# Altium footprint library CoilcraftPCB.PcbLib: 320 footprints (part 7 of 20)
Each footprint in its own frame and in the unit in brackets; x right, y up, seen from the top. Pads: shape width x height; smd on the part's side, far side on the other; paste and mask are expansions set on the pad; w line width, h text height; cw(c..) or ccw(c..) is an arc to the next point about the centre after c.
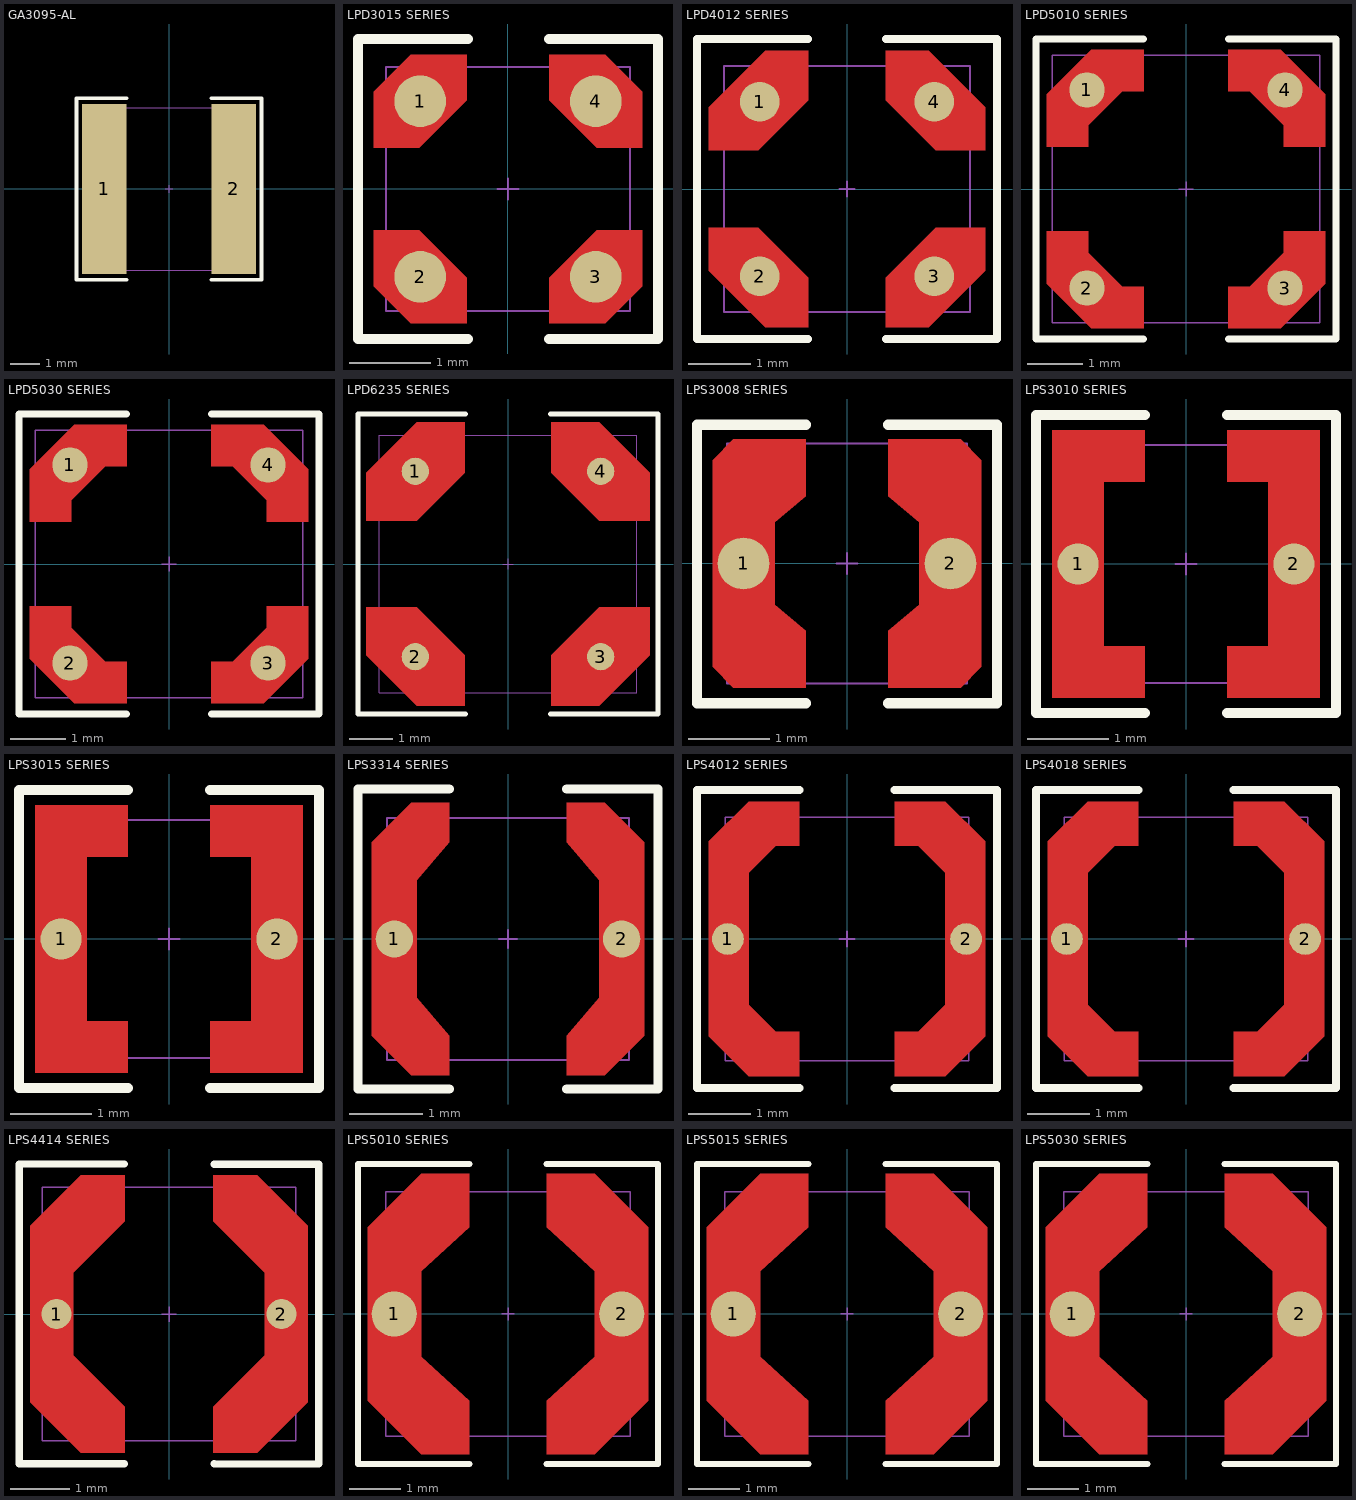
[diagram p6: the footprints below, top view; thin cyan lines are the x and y axes]

## GA3095-AL [mil] "Coilcraft High Current Air Core Inductors"
height 195
pads (2):
  rect 60x230 smd: 1(-87.5,0) 2(87.5,0)
Top Overlay:
  lines w5: -57.5,-122.5 -125,-122.5 -125,122.5 -57.5,122.5 ; 57.5,-122.5 125,-122.5 125,122.5 57.5,122.5
Mechanical 13:
  lines w1: -5,0 5,0 ; 0,-5 0,5
Mechanical 14:
  lines w1: -115,-110 115,-110 115,110 -115,110 -115,-110
3D body: height 180, standoff 0, extent -109.5,-104.5 109.5,105.5

## LPD3015 SERIES [mil] "Coilcraft Coupled Inductors"
height 55
pads (4):
  round 25 smd mask+0: 1(-42.43,42.43) 2(-42.43,-42.43) 3(42.43,-42.43) 4(42.43,42.43)
Top Layer:
  region: -43,20 -20,43 -20,65 -47,65 -65,47 -65,20
  region: -20,-43 -43,-20 -65,-20 -65,-47 -47,-65 -20,-65
  region: 43,-20 20,-43 20,-65 47,-65 65,-47 65,-20
  region: 20,43 43,20 65,20 65,47 47,65 20,65
Top Overlay:
  lines w5: -19.5,-72.5 -72.5,-72.5 -72.5,72.5 -19.5,72.5 ; 20,-72.5 72.5,-72.5 72.5,72.5 20,72.5
Top Paste:
  region: 20,43 43,20 65,20 65,47 47,65 20,65
  region: 43,-20 20,-43 20,-65 47,-65 65,-47 65,-20
  region: -20,-43 -43,-20 -65,-20 -65,-47 -47,-65 -20,-65
  region: -43,20 -20,43 -20,65 -47,65 -65,47 -65,20
Mechanical 13:
  lines w1: -5,0 5,0 ; 0,-5 0,5
Mechanical 14:
  lines w1: -59,-59 59,-59 59,59 -59,59 -59,-59
3D body: height 59.15, standoff 0.09, extent -60.55,-60.6 60.55,60.5

## LPD4012 SERIES [mil] "Coilcraft Coupled Inductors"
height 43.3
pads (4):
  round 25 smd mask+0: 1(-55,55) 2(-55,-55) 3(55,-55) 4(55,55)
Top Layer:
  region: 56,-24.5 87,-24.5 87,-51.5 51.5,-87 24.5,-87 24.5,-56
  region: -24.5,-56 -24.5,-87 -51.5,-87 -87,-51.5 -87,-24.5 -56,-24.5
  region: -56,24.5 -87,24.5 -87,51.5 -51.5,87 -24.5,87 -24.5,56
  region: 24.5,56 24.5,87 51.5,87 87,51.5 87,24.5 56,24.5
Top Overlay:
  lines w5: -24.5,-94.5 -94.5,-94.5 -94.5,94.5 -24.5,94.5 ; 24.5,-94.5 94.5,-94.5 94.5,94.5 24.5,94.5
Top Paste:
  region: 24.5,56 24.5,87 51.5,87 87,51.5 87,24.5 56,24.5
  region: -56,24.5 -87,24.5 -87,51.5 -51.5,87 -24.5,87 -24.5,56
  region: -24.5,-56 -24.5,-87 -51.5,-87 -87,-51.5 -87,-24.5 -56,-24.5
  region: 56,-24.5 87,-24.5 87,-51.5 51.5,-87 24.5,-87 24.5,-56
Mechanical 13:
  lines w1: -5,0 5,0 ; 0,-5 0,5
Mechanical 14:
  lines w1: -77.5,-77.5 -77.5,77.5 77.5,77.5 77.5,-77.5 -77.5,-77.5
3D body: height 47.34, standoff 0.09, extent -79.05,-79.11 79.05,79

## LPD5010 SERIES [mil] "Coilcraft Coupled Inductors"
height 35
pads (4):
  round 25 smd mask+0: 1(-70,70) 2(-70,-70) 3(70,-70) 4(70,70)
Top Layer:
  region: 30,-69 30,-98.5 67,-98.5 98.5,-67 98.5,-30 69,-30 69,-45 45,-69
  region: 69,30 98.5,30 98.5,67 67,98.5 30,98.5 30,69 45,69 69,45
  region: -30,69 -30,98.5 -67,98.5 -98.5,67 -98.5,30 -69,30 -69,45 -45,69
  region: -69,-30 -98.5,-30 -98.5,-67 -67,-98.5 -30,-98.5 -30,-69 -45,-69 -69,-45
Top Overlay:
  lines w5: -30,-106 -106,-106 -106,106 -30,106 ; 30,-106 106,-106 106,106 30,106
Top Paste:
  region: -69,-30 -98.5,-30 -98.5,-67 -67,-98.5 -30,-98.5 -30,-69 -45,-69 -69,-45
  region: -30,69 -30,98.5 -67,98.5 -98.5,67 -98.5,30 -69,30 -69,45 -45,69
  region: 69,30 98.5,30 98.5,67 67,98.5 30,98.5 30,69 45,69 69,45
  region: 30,-69 30,-98.5 67,-98.5 98.5,-67 98.5,-30 69,-30 69,-45 45,-69
Mechanical 13:
  lines w1: -5,0 5,0 ; 0,-5 0,5
Mechanical 14:
  lines w1: -94.5,-94.5 94.5,-94.5 94.5,94.5 -94.5,94.5 -94.5,-94.5
3D body: height 39.46, standoff 0.09, extent -95.98,-95.97 95.98,96

## LPD5030 SERIES [mil] "Coilcraft Coupled Inductors"
height 114
pads (4):
  round 25 smd mask+0: 1(-70,70) 2(-70,-70) 3(70,-70) 4(70,70)
Top Layer:
  region: 30,-69 30,-98.5 67,-98.5 98.5,-67 98.5,-30 69,-30 69,-45 45,-69
  region: 69,30 98.5,30 98.5,67 67,98.5 30,98.5 30,69 45,69 69,45
  region: -30,69 -30,98.5 -67,98.5 -98.5,67 -98.5,30 -69,30 -69,45 -45,69
  region: -69,-30 -98.5,-30 -98.5,-67 -67,-98.5 -30,-98.5 -30,-69 -45,-69 -69,-45
Top Overlay:
  lines w5: -30,-106 -106,-106 -106,106 -30,106 ; 30,-106 106,-106 106,106 30,106
Top Paste:
  region: -69,-30 -98.5,-30 -98.5,-67 -67,-98.5 -30,-98.5 -30,-69 -45,-69 -69,-45
  region: -30,69 -30,98.5 -67,98.5 -98.5,67 -98.5,30 -69,30 -69,45 -45,69
  region: 69,30 98.5,30 98.5,67 67,98.5 30,98.5 30,69 45,69 69,45
  region: 30,-69 30,-98.5 67,-98.5 98.5,-67 98.5,-30 69,-30 69,-45 45,-69
Mechanical 13:
  lines w1: -5,0 5,0 ; 0,-5 0,5
Mechanical 14:
  lines w1: -94.5,-94.5 94.5,-94.5 94.5,94.5 -94.5,94.5 -94.5,-94.5
3D body: height 118.2, standoff 0.09, extent -95.98,-95.97 95.98,96

## LPD6235 SERIES [mil] "Coilcraft Coupled Inductors"
height 138
pads (4):
  round 25 smd mask+0: 1(-85,85) 2(-85,-85) 3(85,-85) 4(85,85)
Top Layer:
  region: 39.5,83.5 39.5,130 83.5,130 130,83.5 130,39.5 83.5,39.5
  region: -83.5,39.5 -130,39.5 -130,83.5 -83.5,130 -39.5,130 -39.5,83.5
  region: -39.5,-83.5 -39.5,-130 -83.5,-130 -130,-83.5 -130,-39.5 -83.5,-39.5
  region: 83.5,-39.5 130,-39.5 130,-83.5 83.5,-130 39.5,-130 39.5,-83.5
Top Overlay:
  lines w5: -39,-137.5 -137.5,-137.5 -137.5,137.5 -39,137.5 ; 39,-137.5 137.5,-137.5 137.5,137.5 39,137.5
Top Paste:
  region: 83.5,-39.5 130,-39.5 130,-83.5 83.5,-130 39.5,-130 39.5,-83.5
  region: -39.5,-83.5 -39.5,-130 -83.5,-130 -130,-83.5 -130,-39.5 -83.5,-39.5
  region: -83.5,39.5 -130,39.5 -130,83.5 -83.5,130 -39.5,130 -39.5,83.5
  region: 39.5,83.5 39.5,130 83.5,130 130,83.5 130,39.5 83.5,39.5
Mechanical 13:
  lines w1: -5,0 5,0 ; 0,-5 0,5
Mechanical 14:
  lines w1: -118,-118 118,-118 118,118 -118,118 -118,-118
3D body: height 139.8, standoff 2, extent -119.68,-119.37 119.68,120

## LPS3008 SERIES [mil] "Coilcraft Shielded SMT Power Inductors"
height 31.5
pads (2):
  round 25 smd mask+0: 1(-50,0) 2(50,0)
Top Layer:
  region: 35,20 20,32.5 20,60 55,60 65,50 65,-50 55,-60 20,-60 20,-32.5 35,-20
  region: -35,-20 -20,-32.5 -20,-60 -55,-60 -65,-50 -65,50 -55,60 -20,60 -20,32.5 -35,20
Top Overlay:
  lines w5: -20,-67.5 -72.5,-67.5 -72.5,67 -20,67 ; 20,-67.5 72.5,-67.5 72.5,67 20,67
Top Paste:
  region: -35,-20 -20,-32.5 -20,-60 -55,-60 -65,-50 -65,50 -55,60 -20,60 -20,32.5 -35,20
  region: 35,20 20,32.5 20,60 55,60 65,50 65,-50 55,-60 20,-60 20,-32.5 35,-20
Mechanical 13:
  lines w1: -5,0 5,0 ; 0,-5 0,5
Mechanical 14:
  lines w1: -58,-58 58,-58 58,58 -58,58 -58,-58
3D body: height 31.5, standoff 0, extent -62.12,-62.12 62.13,62.13

## LPS3010 SERIES [mil] "Coilcraft Shielded SMT Power Inductors"
height 35
pads (2):
  round 20 smd mask+0: 1(-52.5,0) 2(52.5,0)
Top Layer:
  region: -65,65 -20,65 -20,40 -40,40 -40,-40 -20,-40 -20,-65 -65,-65
  region: 65,-65 20,-65 20,-40 40,-40 40,40 20,40 20,65 65,65
Top Overlay:
  lines w5: -20,-72.5 -73,-72.5 -73,72.5 -20,72.5 ; 20,-72.5 73,-72.5 73,72.5 20,72.5
Top Paste:
  region: 65,-65 20,-65 20,-40 40,-40 40,40 20,40 20,65 65,65
  region: -65,65 -20,65 -20,40 -40,40 -40,-40 -20,-40 -20,-65 -65,-65
Mechanical 13:
  lines w1: -5,0 5,0 ; 0,-5 0,5
Mechanical 14:
  lines w1: -58,-58 -58,58 58,58 58,-58 -58,-58
3D body: height 39.37, standoff 0, extent -62.12,-62.12 62.13,62.13

## LPS3015 SERIES [mil] "Coilcraft Shielded SMT Power Inductors"
height 55
pads (2):
  round 20 smd mask+0: 1(-52.5,0) 2(52.5,0)
Top Layer:
  region: -65,65 -20,65 -20,40 -40,40 -40,-40 -20,-40 -20,-65 -65,-65
  region: 65,-65 20,-65 20,-40 40,-40 40,40 20,40 20,65 65,65
Top Overlay:
  lines w5: -20,-72.5 -73,-72.5 -73,72.5 -20,72.5 ; 20,-72.5 73,-72.5 73,72.5 20,72.5
Top Paste:
  region: 65,-65 20,-65 20,-40 40,-40 40,40 20,40 20,65 65,65
  region: -65,65 -20,65 -20,40 -40,40 -40,-40 -20,-40 -20,-65 -65,-65
Mechanical 13:
  lines w1: -5,0 5,0 ; 0,-5 0,5
Mechanical 14:
  lines w1: -58,-58 -58,58 58,58 58,-58 -58,-58
3D body: height 59.06, standoff 0, extent -62.12,-62.12 62.13,62.13

## LPS3314 SERIES [mil] "Coilcraft Shielded SMT Power Inductors"
height 51.2
pads (2):
  round 20 smd mask+0: 1(-61,0) 2(61,0)
Top Layer:
  region: 49,31.5 31.5,52 31.5,73 52,73 73,52 73,-52 52,-73 31.5,-73 31.5,-52 49,-31.5
  region: -49,-31.5 -31.5,-52 -31.5,-73 -52,-73 -73,-52 -73,52 -52,73 -31.5,73 -31.5,52 -49,31.5
Top Overlay:
  lines w5: -31.5,-80.5 -80.5,-80.5 -80.5,80.5 -31.5,80.5 ; 31.5,-80.5 80.5,-80.5 80.5,80.5 31.5,80.5
Top Paste:
  region: -49,-31.5 -31.5,-52 -31.5,-73 -52,-73 -73,-52 -73,52 -52,73 -31.5,73 -31.5,52 -49,31.5
  region: 49,31.5 31.5,52 31.5,73 52,73 73,52 73,-52 52,-73 31.5,-73 31.5,-52 49,-31.5
Mechanical 13:
  lines w1: -5,0 5,0 ; 0,-5 0,5
Mechanical 14:
  lines w1: -65,-65 65,-65 65,65 -65,65 -65,-65
3D body: height 55.12, standoff 0, extent -66.92,-66.92 66.93,66.93

## LPS4012 SERIES [mil] "Coilcraft Shielded SMT Power Inductors"
height 43.3
pads (2):
  round 20 smd mask+0: 1(-75,0) 2(75,0)
Top Layer:
  region: 30.03,86.61 62.03,86.61 87.03,61.61 87.03,-61.39 62.03,-86.39 30.03,-86.39 30.03,-58.39 45.03,-58.39 62.03,-41.39 62.03,41.61 45.03,58.61 30.03,58.61
  region: -29.97,-86.39 -61.97,-86.39 -86.97,-61.39 -86.97,61.61 -61.97,86.61 -29.97,86.61 -29.97,58.61 -44.97,58.61 -61.97,41.61 -61.97,-41.39 -44.97,-58.39 -29.97,-58.39
Top Overlay:
  lines w5: -30,-94 -94.5,-94 -94.5,94 -30,94 ; 30.03,-94 94.5,-94 94.5,94 30.03,94
Top Paste:
  region: 30.03,86.61 62.03,86.61 87.03,61.61 87.03,-61.39 62.03,-86.39 30.03,-86.39 30.03,-58.39 45.03,-58.39 62.03,-41.39 62.03,41.61 45.03,58.61 30.03,58.61
  region: -29.97,-86.39 -61.97,-86.39 -86.97,-61.39 -86.97,61.61 -61.97,86.61 -29.97,86.61 -29.97,58.61 -44.97,58.61 -61.97,41.61 -61.97,-41.39 -44.97,-58.39 -29.97,-58.39
Mechanical 13:
  lines w1: -5,0 5,0 ; 0,-5 0,5
Mechanical 14:
  lines w1: -76.75,-76.75 76.75,-76.75 76.75,76.75 -76.75,76.75 -76.75,-76.75
3D body: height 47.24, standoff 0, extent -80.82,-80.82 80.83,80.83

## LPS4018 SERIES [mil] "Coilcraft Shielded SMT Power Inductors"
height 66.9
pads (2):
  round 20 smd mask+0: 1(-75,0) 2(75,0)
Top Layer:
  region: 30.03,86.61 62.03,86.61 87.03,61.61 87.03,-61.39 62.03,-86.39 30.03,-86.39 30.03,-58.39 45.03,-58.39 62.03,-41.39 62.03,41.61 45.03,58.61 30.03,58.61
  region: -29.97,-86.39 -61.97,-86.39 -86.97,-61.39 -86.97,61.61 -61.97,86.61 -29.97,86.61 -29.97,58.61 -44.97,58.61 -61.97,41.61 -61.97,-41.39 -44.97,-58.39 -29.97,-58.39
Top Overlay:
  lines w5: -30,-94 -94.5,-94 -94.5,94 -30,94 ; 30.03,-94 94.5,-94 94.5,94 30.03,94
Top Paste:
  region: 30.03,86.61 62.03,86.61 87.03,61.61 87.03,-61.39 62.03,-86.39 30.03,-86.39 30.03,-58.39 45.03,-58.39 62.03,-41.39 62.03,41.61 45.03,58.61 30.03,58.61
  region: -29.97,-86.39 -61.97,-86.39 -86.97,-61.39 -86.97,61.61 -61.97,86.61 -29.97,86.61 -29.97,58.61 -44.97,58.61 -61.97,41.61 -61.97,-41.39 -44.97,-58.39 -29.97,-58.39
Mechanical 13:
  lines w1: -5,0 5,0 ; 0,-5 0,5
Mechanical 14:
  lines w1: -76.75,-76.75 76.75,-76.75 76.75,76.75 -76.75,76.75 -76.75,-76.75
3D body: height 70.87, standoff 0, extent -80.82,-80.82 80.83,80.83

## LPS4414 SERIES [mil] "Coilcraft Shielded SMT Power Inductors"
height 55.1
pads (2):
  round 20 smd mask+0: 1(-75,0) 2(75,0)
Top Layer:
  region: 29.5,62 29.5,92.5 59,92.5 92.5,59 92.5,-59 59,-92.5 29.5,-92.5 29.5,-62 64,-27.5 64,27.5
  region: -29.5,-62 -29.5,-92.5 -59,-92.5 -92.5,-59 -92.5,59 -59,92.5 -29.5,92.5 -29.5,62 -64,27.5 -64,-27.5
Top Overlay:
  lines w5: -30,-100 -100,-100 -100,100 -30,100 ; 30.03,-100 100,-100 100,100 30.03,100
Top Paste:
  region: -29.5,-62 -29.5,-92.5 -59,-92.5 -92.5,-59 -92.5,59 -59,92.5 -29.5,92.5 -29.5,62 -64,27.5 -64,-27.5
  region: 29.5,62 29.5,92.5 59,92.5 92.5,59 92.5,-59 59,-92.5 29.5,-92.5 29.5,-62 64,-27.5 64,27.5
Mechanical 13:
  lines w1: -5,0 5,0 ; 0,-5 0,5
Mechanical 14:
  lines w1: -84.5,-84.5 -84.5,84.5 84.5,84.5 84.5,-84.5 -84.5,-84.5
3D body: height 55.12, standoff 0, extent -86.61,-86.61 86.62,86.62

## LPS5010 SERIES [mil] "Coilcraft Shielded SMT Power Inductors"
height 35.4
pads (2):
  round 35 smd mask+0: 1(-88,0) 2(88,0)
Top Layer:
  region: 30,67 30,108.5 67,108.5 108.5,67 108.5,-67 67,-108.5 30,-108.5 30,-67 67,-33 67,33
  region: -30,-67 -30,-108.5 -67,-108.5 -108.5,-67 -108.5,67 -67,108.5 -30,108.5 -30,67 -67,33 -67,-33
Top Overlay:
  lines w5: -30,-116 -116,-116 -116,116 -30,116 ; 30.03,-116 116,-116 116,116 30.03,116
Top Paste:
  region: -30,-67 -30,-108.5 -67,-108.5 -108.5,-67 -108.5,67 -67,108.5 -30,108.5 -30,67 -67,33 -67,-33
  region: 30,67 30,108.5 67,108.5 108.5,67 108.5,-67 67,-108.5 30,-108.5 30,-67 67,-33 67,33
Mechanical 13:
  lines w1: -5,0 5,0 ; 0,-5 0,5
Mechanical 14:
  lines w1: -94.5,-94.5 94.5,-94.5 94.5,94.5 -94.5,94.5 -94.5,-94.5
3D body: height 39.37, standoff 0, extent -98.62,-98.62 98.62,98.62

## LPS5015 SERIES [mil] "Coilcraft Shielded SMT Power Inductors"
height 55.1
pads (2):
  round 35 smd mask+0: 1(-88,0) 2(88,0)
Top Layer:
  region: -30,-67 -30,-108.5 -67,-108.5 -108.5,-67 -108.5,67 -67,108.5 -30,108.5 -30,67 -67,33 -67,-33
  region: 30,67 30,108.5 67,108.5 108.5,67 108.5,-67 67,-108.5 30,-108.5 30,-67 67,-33 67,33
Top Overlay:
  lines w5: -30,-116 -116,-116 -116,116 -30,116 ; 30.03,-116 116,-116 116,116 30.03,116
Top Paste:
  region: 30,67 30,108.5 67,108.5 108.5,67 108.5,-67 67,-108.5 30,-108.5 30,-67 67,-33 67,33
  region: -30,-67 -30,-108.5 -67,-108.5 -108.5,-67 -108.5,67 -67,108.5 -30,108.5 -30,67 -67,33 -67,-33
Mechanical 13:
  lines w1: -5,0 5,0 ; 0,-5 0,5
Mechanical 14:
  lines w1: -94.5,-94.5 -94.5,94.5 94.5,94.5 94.5,-94.5 -94.5,-94.5
3D body: height 59.06, standoff 0, extent -98.62,-98.62 98.62,98.62

## LPS5030 SERIES [mil] "Coilcraft Shielded SMT Power Inductors"
height 114
pads (2):
  round 35 smd mask+0: 1(-88,0) 2(88,0)
Top Layer:
  region: 30,67 30,108.5 67,108.5 108.5,67 108.5,-67 67,-108.5 30,-108.5 30,-67 67,-33 67,33
  region: -30,-67 -30,-108.5 -67,-108.5 -108.5,-67 -108.5,67 -67,108.5 -30,108.5 -30,67 -67,33 -67,-33
Top Overlay:
  lines w5: -30,-116 -116,-116 -116,116 -30,116 ; 30.03,-116 116,-116 116,116 30.03,116
Top Paste:
  region: -30,-67 -30,-108.5 -67,-108.5 -108.5,-67 -108.5,67 -67,108.5 -30,108.5 -30,67 -67,33 -67,-33
  region: 30,67 30,108.5 67,108.5 108.5,67 108.5,-67 67,-108.5 30,-108.5 30,-67 67,-33 67,33
Mechanical 13:
  lines w1: -5,0 5,0 ; 0,-5 0,5
Mechanical 14:
  lines w1: -94.5,-94.5 94.5,-94.5 94.5,94.5 -94.5,94.5 -94.5,-94.5
3D body: height 118.11, standoff 0, extent -98.62,-98.62 98.62,98.62